# Altium schematic symbol library 环境监测系统原理图库.SchLib: 11 symbols
Pins are listed as number, name and electrical type; pins without a type are passive.

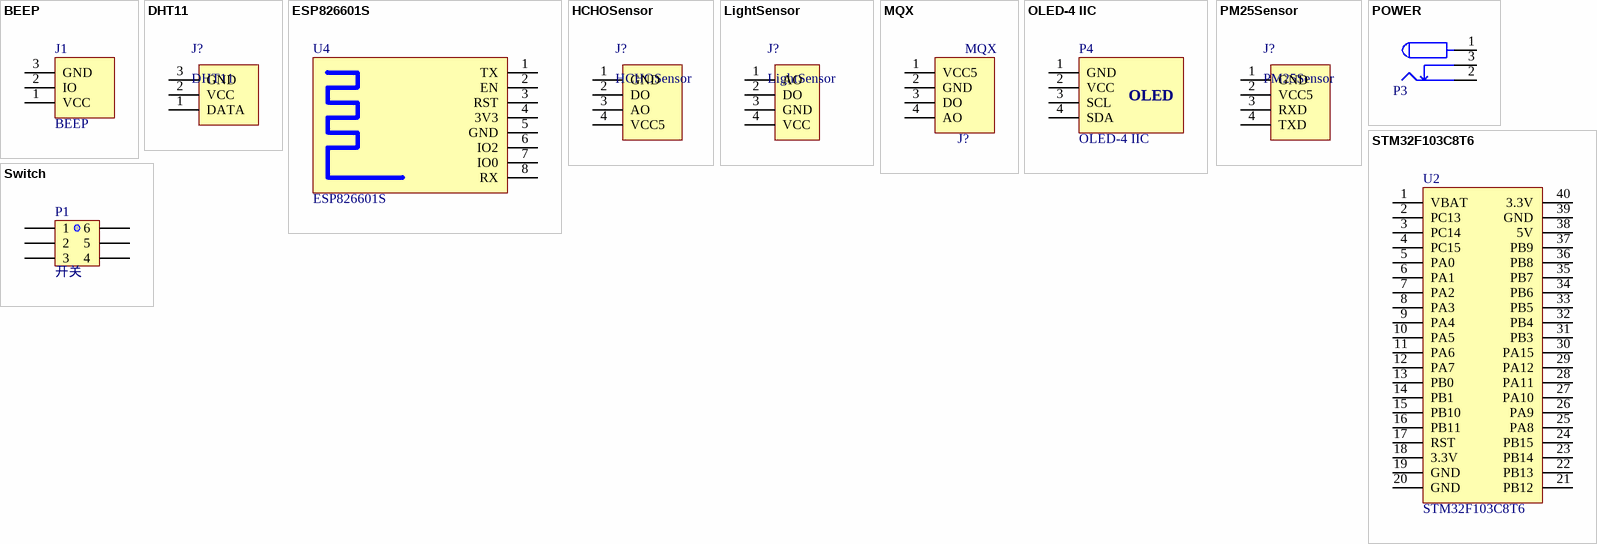
[diagram p0: symbols BEEP to Switch]

## BEEP
designator J1
蜂鸣器
footprint BEEP (蜂鸣器)
pins: 1 VCC, 2 IO, 3 GND

## DHT11
designator J?
温湿度传感器
pins: 1 DATA, 2 VCC, 3 GND

## ESP826601S
designator U4
footprint ESP-01S (排母，4脚)
pins: 1 TX, 2 EN, 3 RST, 4 3V3, 5 GND, 6 IO2, 7 IO0, 8 RX

## HCHOSensor
designator J?
甲醛传感器
pins: 1 GND, 2 DO, 3 AO, 4 VCC5

## LightSensor
designator J?
光敏传感器
pins: 1 AO, 2 DO, 3 GND, 4 VCC

## MQX
designator J?
二氧化碳传感器; BOM名称: 4P接插件; 版权归属: 封装库来自淘宝 ID：黄晶宝石; 学习资源: https://shop463601444.taobao.com
footprint MQX (排针，4脚)
pins: 1 VCC5, 2 GND, 3 DO, 4 AO

## OLED-4 IIC
designator P4
4PIN
footprint OLED 0.96-4P (长：35.4mm，宽：33.5mm，)
pins: 1 GND, 2 VCC, 3 SCL, 4 SDA
text: OLED

## PM25Sensor
designator J?
PM25传感器
pins: 1 GND, 2 VCC5, 3 RXD, 4 TXD

## POWER
designator P3, comment 电源插座  (value not drawn)
3PIN
footprint DC-002 (3.5*1.1mm,       淘宝ID:黄晶宝石)
pins: 1, 2, 3

## STM32F103C8T6
designator U2
40PIN
footprint STM32F103C8T6
pins: 1 VBAT, 2 PC13, 3 PC14, 4 PC15, 5 PA0, 6 PA1, 7 PA2, 8 PA3, 9 PA4, 10 PA5, 11 PA6, 12 PA7, 13 PB0, 14 PB1, 15 PB10, 16 PB11, 17 RST, 18 3.3V, 19 GND, 20 GND, 21 PB12, 22 PB13, 23 PB14, 24 PB15, 25 PA8, 26 PA9, 27 PA10, 28 PA11, 29 PA12, 30 PA15, 31 PB3, 32 PB4, 33 PB5, 34 PB6, 35 PB7, 36 PB8, 37 PB9, 38 5V, 39 GND, 40 3.3V

## Switch
designator P1, comment 开关
footprint KFT DIP-7X7 (自锁开关，规格：7*7mm)
pins: 1, 2, 3, 4, 5, 6